# Altium footprint library Ib_.PcbLib: 55 footprints (part 2 of 4)
Each footprint in its own frame and in the unit in brackets; x right, y up, seen from the top. Pads: shape width x height; smd on the part's side, far side on the other; paste and mask are expansions set on the pad; w line width, h text height; cw(c..) or ccw(c..) is an arc to the next point about the centre after c.
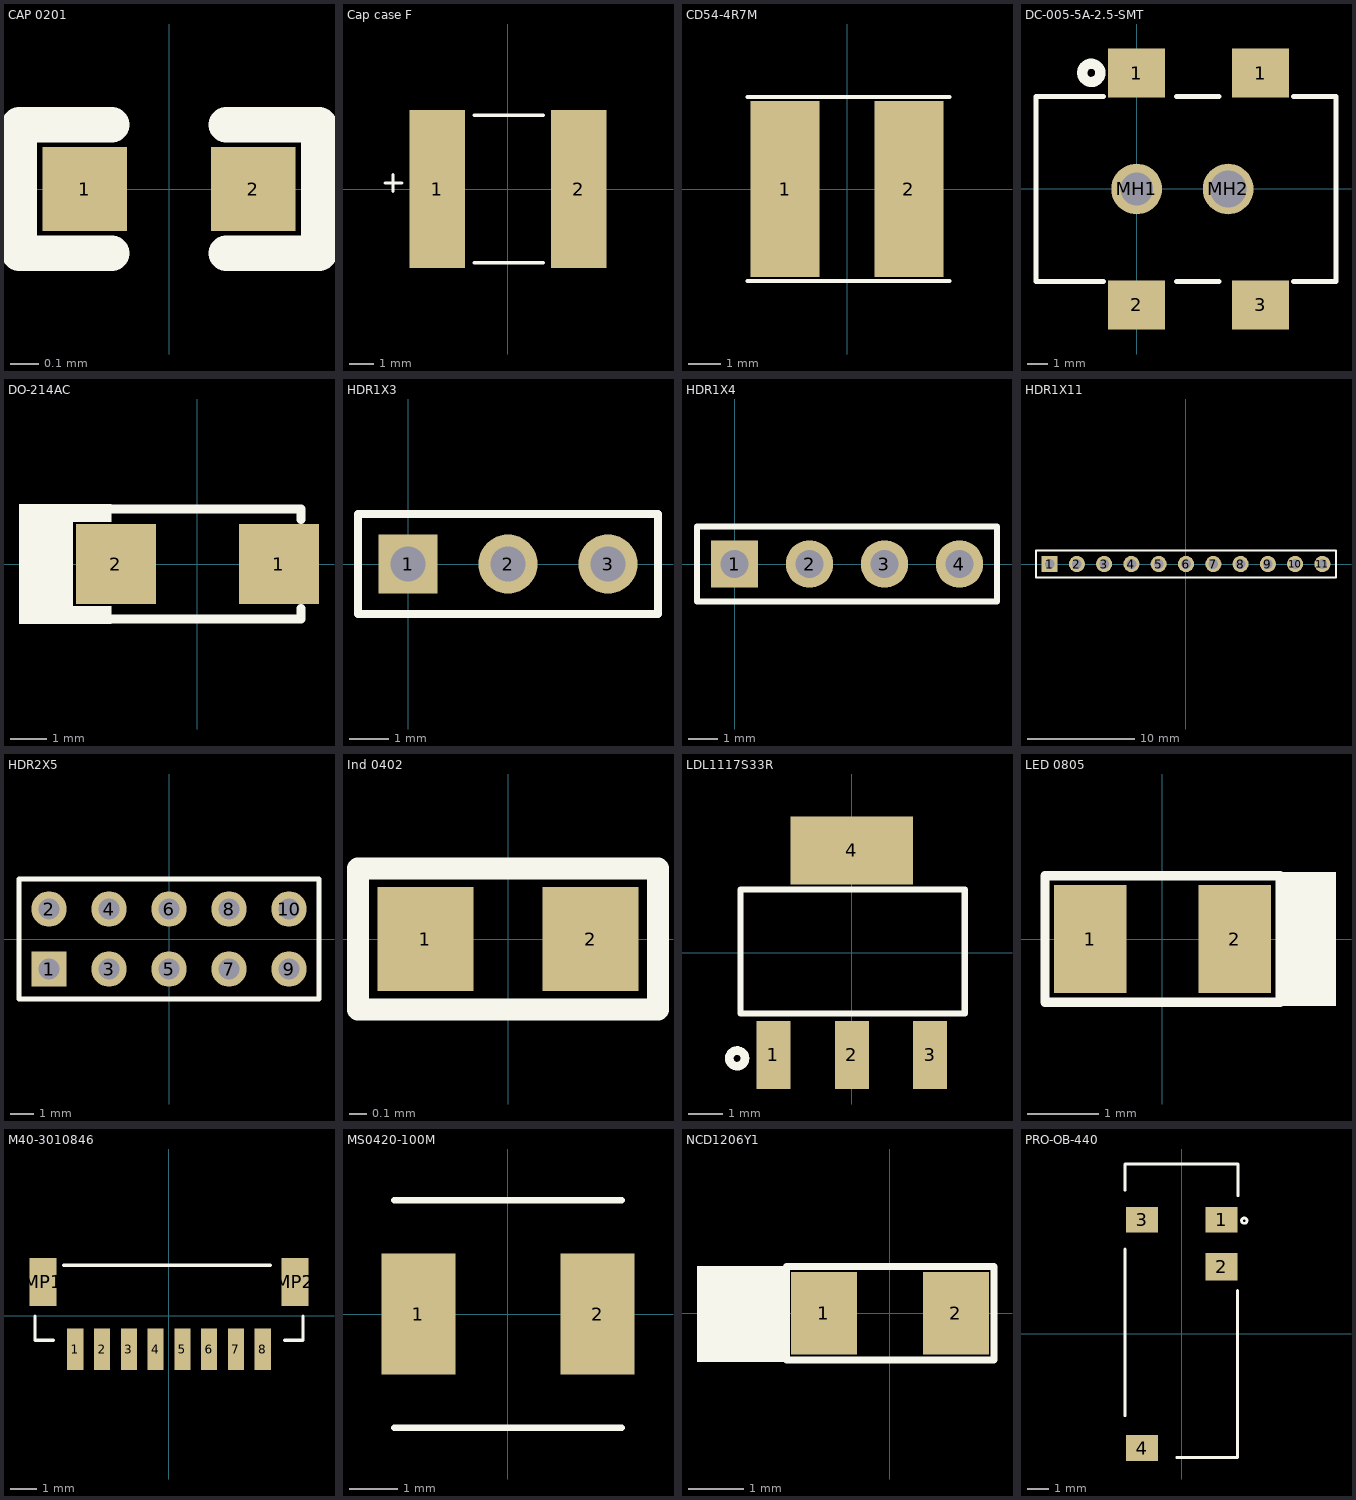
[diagram p1: the footprints below, top view; thin cyan lines are the x and y axes]

## CAP 0201 [mm]
pads (2):
  rect 0.3x0.3 smd mask+0.055: 1(-0.3,0) 2(0.3,0)
Top Overlay:
  lines w0.127: -0.203,-0.229 -0.533,-0.229 -0.533,0.229 -0.203,0.229 ; 0.203,-0.229 0.533,-0.229 0.533,0.229 0.203,0.229
3D body "User Library-SMD Ceramic Capacitors_0201 (0603)_AB.STEP": height 0.28, standoff -0.02, extent -0.3,-0.15 0.301,0.15

## Cap case F [mm]
pads (2):
  rect 2.3x6.6 smd mask+0.055: 1(-2.95,0)
  rect 2.3x6.6 smd: 2(2.95,0)
Top Overlay:
  lines w0.127: -5.131,0.254 -4.42,0.254 ; -4.801,-0.102 -4.801,0.61 ; -1.422,-3.073 1.473,-3.073 ; -1.422,3.073 1.473,3.073
3D body "597D107X0035F2T.stp": height 4.69, standoff -0.01, extent -4.635,-3.023 2.959,3.023

## CD54-4R7M [mm]
pads (2):
  rect 2.15x5.5 smd mask+0.055: 1(-1.925,0) 2(1.925,0)
Top Overlay:
  lines w0.127: -3.099,-2.87 3.2,-2.87 ; -3.099,2.87 3.2,2.87

## DC-005-5A-2.5-SMT [mm]
pads (6):
  rect 2.8x2.4 smd: 1(0,5.7) 1(6.1,5.7) 2(0,-5.7) 3(6.1,-5.7)
  round 2.5 hole 1.6 unplated: MH1(0,0)
  round 2.5 hole 1.8 unplated: MH2(4.5,0)
Top Overlay:
  circle w0.5: c-2.233,5.715 r0.449
  lines w0.254: -4.953,-4.557 -1.626,-4.557 ; -4.953,4.557 -1.626,4.557 ; -4.949,-4.557 -4.949,4.557 ; 1.956,-4.557 4.035,-4.557 ; 1.956,4.557 4.035,4.557 ; 7.726,-4.557 9.804,-4.557 9.805,4.557 7.726,4.557
3D body "CUI-PJ-002A-SMT.step": height 11.17, standoff -1.03, extent -4.987,-6.274 9.813,6.326

## DO-214AC [mm]
pads (2):
  rect 2.21x2.2 smd: 1(2.25,0) 2(-2.25,0)
Top Overlay:
  rectangle: -4.928,-1.65 -3.432,1.65
  rectangle: -3.454,1.166 -2.376,1.65
  rectangle: -3.454,-1.65 -2.376,-1.166
  lines w0.254: -2.618,-1.518 2.86,-1.518 ; -2.618,1.518 2.86,1.518 ; 2.86,-1.496 2.86,-1.232 ; 2.86,1.232 2.86,1.496
3D body "User Library-DO-214AC(SMA).step": height 2.24, standoff -0.04, extent -2.743,-1.397 2.743,1.397

## HDR1X3 [mm] "Connector; Header; 3 Position"
pads (3):
  rect 1.5x1.5 hole 0.9: 1(0,0)
  round 1.5 hole 0.9: 2(2.54,0) 3(5.08,0)
Top Overlay:
  lines w0.2: -1.27,-1.27 -1.27,1.27 6.35,1.27 6.35,-1.27 -1.27,-1.27
3D body "User Library-Header_Male_3Pin.STEP": height 8.54, standoff -3, extent -1.27,-1.245 6.35,1.245

## HDR1X4 [mm] "Connector; Header; 4 Position"
pads (4):
  rect 1.6x1.6 hole 0.95: 1(0,0)
  round 1.6 hole 0.95: 2(2.54,0) 3(5.08,0) 4(7.62,0)
Top Overlay:
  lines w0.2: -1.27,-1.27 8.89,-1.27 8.89,1.27 -1.27,1.27 -1.27,-1.27
3D body "User Library-1x4 TH Pitch 2_54mm.STEP": height 9.5, standoff -3.2, extent -1.27,-1.27 8.89,1.27

## HDR1X11 [mm] "Connector; Header; 11 Position"
pads (11):
  rect 1.5x1.5 hole 0.9: 1(-12.687,0.013)
  round 1.5 hole 0.9: 2(-10.147,0.013) 3(-7.607,0.013) 4(-5.067,0.013) 5(-2.527,0.013) 6(0.013,0.013) 7(2.553,0.013) 8(5.093,0.013) 9(7.633,0.013) 10(10.173,0.013) 11(12.713,0.013)
Top Overlay:
  lines w0.2: -13.957,-1.257 -13.957,1.283 -12.052,1.283 13.983,1.283 13.983,-1.257 -13.957,-1.257
3D body "Pin Header 1x11 TH Pitch 2.54mm.stp": height 9.5, standoff -3.2, extent -13.957,-1.257 13.983,1.283

## HDR2X5 [mm] "Connector; Header; 5x2 Position"
pads (10):
  rect 1.5x1.5 hole 0.9: 1(-5.08,-1.27)
  round 1.5 hole 0.9: 2(-5.08,1.27) 3(-2.54,-1.27) 4(-2.54,1.27) 5(0,-1.27) 6(0,1.27) 7(2.54,-1.27) 8(2.54,1.27) 9(5.08,-1.27) 10(5.08,1.27)
Top Overlay:
  lines w0.2: -6.35,-2.54 6.35,-2.54 6.35,2.54 -6.35,2.54 -6.35,-2.54
3D body "70288219.stp": height 8.8, standoff -3, extent -6.35,-2.5 6.35,2.5

## Ind 0402 [mm]
pads (2):
  rect 0.55x0.6 smd: 1(-0.475,0) 2(0.475,0)
Top Overlay:
  lines w0.127: -0.864,-0.406 0.864,-0.406 0.864,0.406 -0.864,0.406 -0.864,-0.406
3D body "LQG15HN7N5J02D.STEP": height 0.48, standoff -0.02, extent -0.5,-0.279 0.5,0.271

## LDL1117S33R [mm] "IC REG LINEAR 3.3V 1.2A SOT223"
pads (4):
  rect 1x2 smd: 1(-2.3,-3.002) 2(0,-3.002) 3(2.3,-3.002)
  rect 3.6x2 smd: 4(0,3.002)
Top Overlay:
  circle w0.254: c-3.367,-3.103 r0.23
  lines w0.178: 3.263,-1.782 -3.265,-1.782 -3.265,1.85 3.313,1.85 3.313,-1.782
3D body "SW3dPS-SOT-223-1.STEP": height 1.54, standoff -0.11, extent -3.237,-3.454 3.263,3.546

## LED 0805 [mil]
pads (2):
  rect 40x60 smd: 1(-39.99,0.01) 2(40.01,0.01)
Top Overlay:
  region: 96.01,37.01 64.01,37.01 64.01,-36.99 96.01,-36.99
  lines w5: -64.99,-34.99 -64.99,35.01 65.01,35.01 65.01,-34.99 -64.99,-34.99
3D body "User Library-User Library-led_0805 GRE.step": height 43.31, standoff 0, extent -39.76,-24.6 39.76,24.6

## M40-3010846 [mm]
pads (10):
  rect 0.6x1.55 smd: 1(-3.5,-1.262) 2(-2.5,-1.262) 3(-1.5,-1.262) 4(-0.5,-1.262) 5(0.5,-1.262) 6(1.5,-1.262) 7(2.5,-1.262) 8(3.5,-1.262)
  rect 1x1.8 smd: MP1(-4.7,1.262) MP2(4.7,1.262)
Top Overlay:
  lines w0.127: -5.004,-0.025 -5.004,-0.914 -4.318,-0.914 ; -3.937,1.88 3.785,1.88 ; 4.318,-0.914 5.004,-0.914 5.004,-0.025
3D body "m40-3010846_asm.stp": height 4.33, standoff -0.02, extent -5,-1.76 5,1.99

## MS0420-100M [mm]
pads (2):
  rect 1.52x2.5 smd: 1(-1.85,0) 2(1.85,0)
Top Overlay:
  lines w0.127: -2.35,-2.35 0,-2.35 2.35,-2.35 ; -2.35,2.35 0,2.35 2.35,2.35

## NCD1206Y1 [mm] "Yellow 589nm 1206 Light Emitting Diodes (LED) RoHS"
pads (2):
  rect 1.2x1.5 smd: 1(-1.2,0) 2(1.2,0)
Top Overlay:
  rectangle: -3.505,-0.889 -1.88,0.864
  lines w0.127: -1.88,-0.853 -1.88,0.852 1.891,0.852 1.891,-0.853 -1.88,-0.853
3D body "User Library-LED1206Y.STEP": height 1.11, standoff -0.4, extent -1.6,-0.813 1.6,0.787

## PRO-OB-440 [mm] "RF ANT 2.4GHZ STAMPED MET SLD"
pads (4):
  rect 1.5x1.2 smd: 1(1.865,5.35) 3(-1.865,5.35) 4(-1.865,-5.35)
  rect 1.5x1.28 smd: 2(1.865,3.15)
Top Overlay:
  circle w0.127: c2.921,5.309 r0.127
  lines w0.127: -2.667,-3.835 -2.667,3.975 ; -2.667,6.731 -2.667,7.963 2.629,7.963 2.629,6.477 ; -0.241,-5.791 2.603,-5.791 2.603,2.032
3D body "PRO-OB-440--3DModel-STEP-1.STEP": height 3.5, standoff -0.03, extent -2.615,-5.744 2.615,8.005